# Altium schematic symbol library 24V转15V芯片_URA2415S-6WR3.SCHLIB: 1 symbol
Pins are listed as number, name and electrical type; pins without a type are passive.

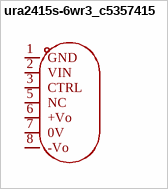
[diagram p0: symbol ura2415s-6wr3_c5357415]

## ura2415s-6wr3_c5357415
designator U??  (value not drawn)
Manufacturer: MORNSUN(金升阳); AddInBom: yes; ModelId: 7194b4e9e999489c853fe7b4c0b888df; ModelName: PWRM-TH_7P-L22.0-W9.5-P2.54-WRE1205S-3WR2; ModelTransform: 866.14,374.015,0,0,0,0,-0.003,-88.587,-157.48; Number of Outputs: 2; Voltage - Supply: 9V~36V; Output Voltage: 15V; Output Current(Max): 200mA; Output Power: 6W; Conversion Efficiency: 83%; Symbol: URA2415S-6WR3_C5357415; LCSC Part Name: URA2415S-6WR3; SupplierPart: C5357415; ManufacturerPart: URA2415S-6WR3; Supplier Footprint: SIP,22x9.5mm; JLCPCB Part Class: Extended Part; Datasheet: https://item.szlcsc.com/datasheet/URA2415S-6WR3/6164697.html; Supplier: LCSC; ConvertToPcb: yes; FootprintName: PWRM-TH_7P-L22.0-W9.5-P2.54-WRE1205S-3WR2
footprint PWRM-TH_7P-L22.0-W9.5-P2.54-WRE1205S-3WR2
pins: 1 GND, 2 VIN, 3 CTRL, 5 NC, 6 +Vo, 7 0V, 8 -Vo